# Altium schematic symbol library 2×2P跳线插针.SCHLIB: 1 symbol
Pins are listed as number, name and electrical type; pins without a type are passive.

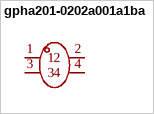
[diagram p0: symbol gpha201-0202a001a1ba]

## gpha201-0202a001a1ba
designator U??  (value not drawn)
插针结构:2x2P;间距:2.54mm;行距:2.54mm;圆针/方针:方针;安装方式:直插;排数:双排;总PIN位数:4P;额定电流:3A;塑高:2.54mm;触头材质:黄铜;触头镀层:金;工作温度:-40℃~+105℃;颜色:黑色;; Manufacturer: GREENCONN(格康); AddInBom: yes; ModelId: 396726ecc332483f84428c142640bc15; ModelName: HDR-TH_4P-P2.54-M-LI-2X2P; ModelTransform: 200.03897,196.85,0,0,0,0,0,0,-118.11; Pin Structure: 2x2P; Pitch: 2.54mm; Circluar Pins/Square Pins: 方针; Current Rating: 3A; Symbol: GPHA201-0202A001A1BA; LCSC Part Name: 2x2P 间距:2.54mm 方针 直插; SupplierPart: C7434503; ManufacturerPart: GPHA201-0202A001A1BA; Supplier Footprint: 插件,P=2.54mm; JLCPCB Part Class: Extended Part; Datasheet: https://item.szlcsc.com/datasheet/GPHA201-0202A001A1BA/8446427.html; Supplier: LCSC; ConvertToPcb: yes; FootprintName: HDR-TH_4P-P2.54-V-M-R2-C2-S2.54; Row Spacing: 2.54mm; Mounting Type: 直插; Number of Rows: 双排; Number of Pins: 4P; Insulation Height: 2.54mm; Contact Material: 黄铜; Contact Plating: 金; Operating Temperature: -40℃~+105℃; Color: 黑色
footprint HDR-TH_4P-P2.54-V-M-R2-C2-S2.54
pins: 1, 2, 3, 4